# Altium footprint library FUSSC324X455X250-2N.PcbLib: 1 footprints
Each footprint in its own frame and in the unit in brackets; x right, y up, seen from the top. Pads: shape width x height; smd on the part's side, far side on the other; paste and mask are expansions set on the pad; w line width, h text height; cw(c..) or ccw(c..) is an arc to the next point about the centre after c.
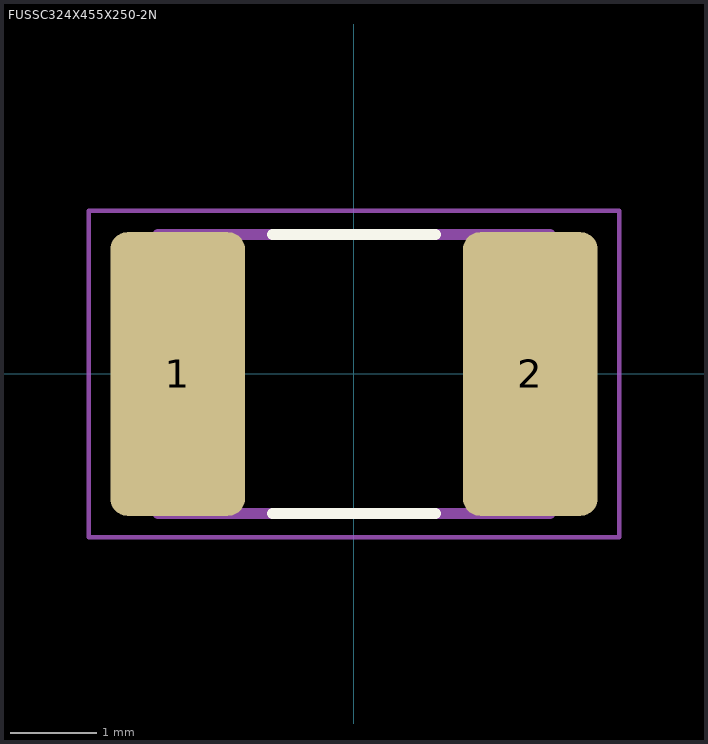
[diagram p0: the footprint, top view; thin cyan lines are the x and y axes]

## FUSSC324X455X250-2N [mm]
height 2.5
pads (2):
  rrect25% 1.56x3.29 smd: 1(-2.045,0) 2(2.045,0)
Top Overlay:
  lines w0.127: -0.945,-1.62 0.945,-1.62 ; -0.945,1.62 0.945,1.62
Mechanical 13:
  lines w0.127: -2.275,-1.62 2.275,-1.62 2.275,1.62 -2.275,1.62 -2.275,-1.62
Mechanical 15:
  lines w0.05: -3.075,-1.895 3.075,-1.895 3.075,1.895 -3.075,1.895 -3.075,-1.895
3D body "step_temp.STEP": height 2.5, standoff 0, extent -2.275,-1.62 2.275,1.62